# Altium footprint library Cole_.PcbLib: 175 footprints (part 10 of 11)
Each footprint in its own frame and in the unit in brackets; x right, y up, seen from the top. Pads: shape width x height; smd on the part's side, far side on the other; paste and mask are expansions set on the pad; w line width, h text height; cw(c..) or ccw(c..) is an arc to the next point about the centre after c.
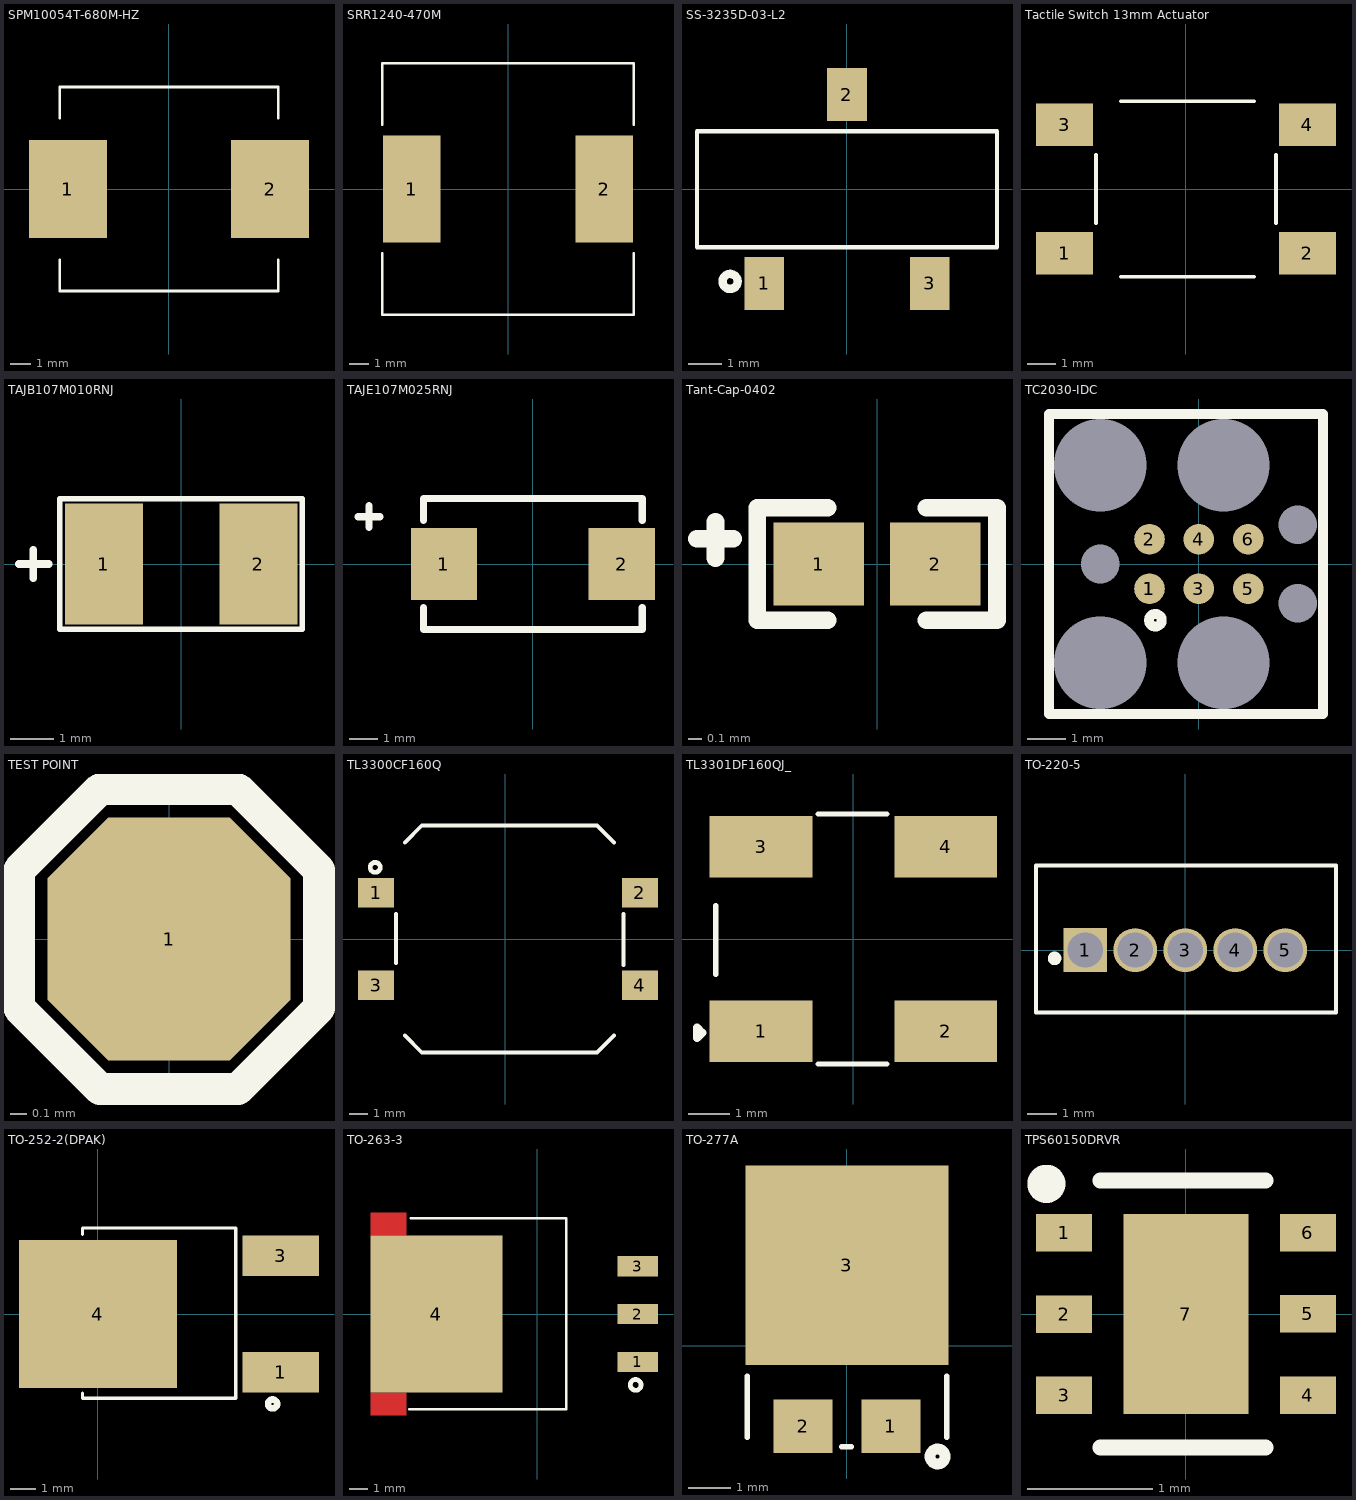
[diagram p9: the footprints below, top view; thin cyan lines are the x and y axes]

## SPM10054T-680M-HZ [mm]
pads (2):
  rect 3.8x4.8 smd mask+0.055: 1(-4.95,0) 2(4.95,0)
Top Overlay:
  lines w0.127: -5.35,-3.47 -5.35,-5 0,-5 5.35,-5 5.35,-3.47 ; -5.35,3.47 -5.35,5 0,5 5.35,5 5.35,3.47

## SRR1240-470M [mm]
pads (2):
  rect 2.9x5.4 smd mask+0.055: 1(-4.85,0) 2(4.85,0)
Top Overlay:
  lines w0.127: -6.325,-3.226 -6.325,-6.325 6.325,-6.325 6.325,-3.226 ; -6.325,3.226 -6.325,6.325 6.325,6.325 6.325,3.226
3D body "srr1240.stp": height 4, standoff 0, extent -6.25,-6.25 6.25,6.25

## SS-3235D-03-L2 [mm] "SPDT 50mA @ 12VDC 12V On-On SMD Toggle Switches RoHS"
pads (3):
  rect 1.2x1.6 smd: 1(-2.5,-2.85) 3(2.5,-2.85)
  rect 1.21x1.6 smd: 2(0,2.85)
Top Overlay:
  circle w0.254: c-3.531,-2.794 r0.227
  lines w0.127: -4.532,-1.758 4.536,-1.758 4.536,1.747 -4.532,1.747 -4.532,-1.758
3D body "ss-3235d-03-l2.stp": height 6.4, standoff 0, extent -4.499,-3.45 4.551,3.45

## Tactile Switch 13mm Actuator [mm]
pads (4):
  rect 2x1.5 smd: 1(-4.25,-2.25) 2(4.25,-2.25) 3(-4.25,2.25) 4(4.25,2.25)
Top Overlay:
  lines w0.127: -3.15,-1.194 -3.15,1.194 ; -2.286,-3.073 2.388,-3.073 ; -2.286,3.073 2.388,3.073 ; 3.15,-1.194 3.15,1.194
3D body "switch.stp": height 16.4, standoff -0.1, extent -4.726,-3 4.574,3

## TAJB107M010RNJ [mil]
pads (2):
  rect 70.87x110 smd: 1(-70,0) 2(70,0)
Top Overlay:
  lines w5: -110,-59 -110,59 110,59 110,-59 -110,-59
  lines w7: -147,0 -120,0
  lines w7.01: -134,-13 -134,13
3D body "User Library-AVX_BCASE.step": height 78.35, standoff -1.57, extent -72.84,-57.68 72.84,57.67

## TAJE107M025RNJ [mm] "CAP TANT 100UF 20% 25V 2917"
pads (2):
  rect 2.31x2.52 smd: 1(-3.1,0) 2(3.1,0)
Top Overlay:
  lines w0.254: -6.096,1.651 -5.334,1.651 ; -5.715,1.27 -5.715,2.032 ; -3.81,-1.524 -3.81,-2.286 3.81,-2.286 3.81,-1.524 ; -3.81,1.524 -3.81,2.286 3.81,2.286 3.81,1.524
3D body "TAJE_AVX.step": height 4.37, standoff 0, extent -3.746,-2.248 3.746,2.248

## Tant-Cap-0402 [mm]
pads (2):
  rect 0.65x0.6 smd mask+0.055: 1(-0.42,0) 2(0.42,0)
Top Overlay:
  lines w0.127: -1.297,0.182 -1.036,0.182 ; -1.164,0.044 -1.164,0.305 ; -0.356,-0.406 -0.864,-0.406 -0.864,0.406 -0.356,0.406 ; 0.357,-0.406 0.865,-0.406 0.865,0.406 0.357,0.406
3D body "TCTseriesUcase_step.STEP": height 0.55, standoff 0, extent -0.5,-0.25 0.5,0.25

## TC2030-IDC [mm] "CABLE ADAPTER 6 POS"
pads (14):
  round 0.787 smd: 1(-1.27,-0.635) 1(-1.27,-0.635) 2(-1.27,0.635) 3(0,-0.635) 4(0,0.635) 5(1.27,-0.635) 6(1.27,0.635)
  round 0 hole 2.375: MP1(-2.54,-2.54) MP2(0.635,-2.54) MP3(0.635,2.54) MP4(-2.54,2.54)
  round 0 hole 0.991: MP5(-2.54,0) MP6(2.54,-1.016) MP7(2.54,1.016)
Top Overlay:
  circle w0.254: c-1.118,-1.448 r0.163
  lines w0.254: -3.861,-3.861 -3.861,3.861 3.2,3.861 3.2,-3.861 -3.861,-3.861

## TEST POINT [mil]
pads (1):
  oct 60x60 smd: 1(0,0)
Top Overlay:
  lines w7.87: -17,-37 17,-37 ; -17,-37 -37,-17 -37,17 -17,37 ; -17,-37 17,-37 ; -17,37 17,37 ; -17,37 17,37 ; 17,-37 37,-17 37,17 17,37

## TL3300CF160Q [mm] "SWITCH TACTILE SPST-NO 0.05A 12V"
height 8.5
pads (4):
  rect 1.95x1.6 smd: 1(-6.975,2.5) 2(7.249,2.5) 3(-6.975,-2.5) 4(7.249,-2.5)
Top Overlay:
  circle w0.254: c-7.023,3.861 r0.27
  lines w0.2: -5.905,-1.295 -5.905,1.342 ; -5.423,-5.207 -4.508,-6.121 4.941,-6.121 5.855,-5.207 ; -5.423,5.207 -4.508,6.121 4.941,6.121 5.855,5.207 ; 6.363,-1.397 6.363,1.368
3D body "Tactal Switch - SMD (12mmx12mmx10.0mm).stp": height 10, standoff 0, extent -7.582,-6.032 7.785,5.982

## TL3301DF160QJ_ [mm]
pads (4):
  rect 2.5x1.5 smd: 1(-2.25,-2.25) 2(2.25,-2.25) 3(-2.25,2.25) 4(2.25,2.25)
Top Overlay:
  lines w0.127: -3.353,-0.864 -3.353,0.813 ; -0.864,-3.048 0.813,-3.048 ; -0.864,3.048 0.813,3.048
  lines w0.2: -3.81,-2.413 -3.81,-2.159 -3.683,-2.286 -3.81,-2.413
3D body "TL3301DFxxxxJ.stp": height 13.32, standoff 0.02, extent -3.301,-3 3.301,3

## TO-220-5 [mm]
pads (5):
  rect 1.5x1.5 hole 1.2: 1(-3.42,0)
  round 1.5 hole 1.2: 2(-1.71,0) 3(0,0) 4(1.71,0) 5(3.42,0)
Top Overlay:
  circle w0.254: c-4.47,-0.279 r0.105
  lines w0.127: -5.105,-2.134 5.156,-2.134 5.156,2.896 -5.105,2.896 -5.105,-2.134
3D body "User Library-to-220-5 v2.step": height 15, standoff -12.82, extent -5.055,-2.08 5.105,2.87

## TO-252-2(DPAK) [mm] "Fixed 40V 5V 500mV @ 250mA TO-252-2(DPAK) Dropout Regulators(LDO) RoHS"
pads (3):
  rect 3x1.6 smd: 1(7.18,-2.283) 3(7.18,2.287)
  rect 6.2x5.8 smd: 4(0,0)
Top Overlay:
  circle w0.254: c6.858,-3.531 r0.178
  lines w0.127: -0.61,-3.099 -0.61,-3.302 5.41,-3.302 5.41,3.378 -0.61,3.378 -0.61,3.124
3D body "DPAK-3_ONS.step": height 1.75, standoff 0, extent -0.599,-3.34 7.468,3.391

## TO-263-3 [mm] "Fixed 26V 12V 1V @ 1A TO-263-3 Dropout Regulators(LDO) RoHS"
pads (4):
  rect 2.16x1.07 smd: 1(5.339,-2.54) 2(5.339,0) 3(5.339,2.54)
  rect 6.99x8.33 smd: 4(-5.339,0)
Top Layer:
  rectangle: -8.833,-5.387 -6.923,-4.152
  rectangle: -8.833,4.164 -6.923,5.399
Top Overlay:
  circle w0.254: c5.232,-3.759 r0.287
  lines w0.127: -6.782,-5.059 1.549,-5.059 1.549,5.08 -6.706,5.08
3D body "NOPB.STEP": height 4.75, standoff -0.05, extent -8.217,-5.105 6.134,5.055

## TO-277A [mm]
pads (3):
  rect 1.4x1.27 smd: 1(1.04,-1.903) 2(-1.04,-1.903)
  rect 4.8x4.72 smd: 3(0,1.903)
Top Overlay:
  circle w0.254: c2.143,-2.616 r0.178
  lines w0.127: -2.362,-2.159 -2.362,-0.711 ; -0.127,-2.388 0.102,-2.388 ; 2.362,-2.159 2.362,-0.711
3D body "86A.STEP": height 1.2, standoff 0, extent -2.3,-2.337 2.3,4.163

## TPS60150DRVR [mm]
pads (7):
  rect 0.45x0.3 smd: 1(-0.975,0.65) 2(-0.975,0) 3(-0.975,-0.65) 4(0.975,-0.65) 5(0.975,0) 6(0.975,0.65)
  rect 1x1.6 smd: 7(0,0)
Top Overlay:
  circle w0.254: c-1.118,1.041 r0.025
  lines w0.127: -0.686,-1.067 0.635,-1.067 ; -0.686,1.067 0.635,1.067
3D body "DRV0006A.stp": height 0.78, standoff -0.02, extent -1,-1 1,1